# Altium schematic symbol library GMC04CG102G25NT.SchLib: 1 symbol
Pins are listed as number, name and electrical type; pins without a type are passive.

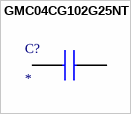
[diagram p0: symbol GMC04CG102G25NT]

## GMC04CG102G25NT
designator C?
1000 pF ±2% 25V Ceramic Capacitor C0G, NP0 0402 (1005 Metric); MF: Vishay Vitramon; MP: VJ0402Y104KXXCW1BC; SnapEDA_Link: https://www.snapeda.com/parts/VJ0402Y104KXXCW1BC/Vishay/view-part/?ref=snap; Package: 0402-2 VISHAY; Value: *; Check_prices: https://www.snapeda.com/parts/VJ0402Y104KXXCW1BC/Vishay/view-part/?ref=eda
footprint CAPC1005X55N
pins: 1, 2